# EAGLE library part LM75ADP,118 (library LM75ADP_118)
Board Mount Temperature Sensors TEMP SENSOR DIGITAL Source: Datasheet <http://www.nxp.com/docs/en/data-sheet/LM75A.pdf>
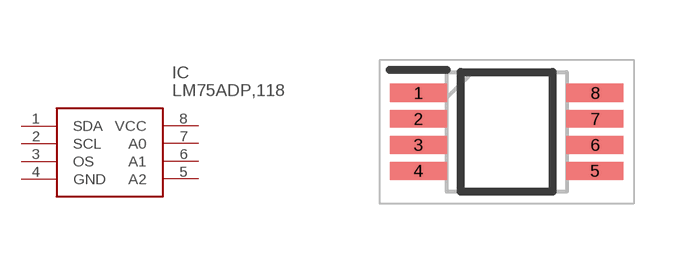
[diagram p0: symbol with the pads of SOP65P490X110-8N; footprint SOP65P490X110-8N]

Designator prefix IC

## LM75ADP,118 (Arrow_Part_Number: LM75ADP,118; Arrow_Price-Stock: https://www.arrow.com/en/products/lm75adp118/nxp-semiconductors.html?utm_currency=USD&region=europe; Description: Board Mount Temperature Sensors TEMP SENSOR DIGITAL; Height: 1.1mm; Manufacturer_Name: NXP; Manufacturer_Part_Number: LM75ADP,118; Mouser_Part_Number: 771-LM75ADP-T; Mouser_Price-Stock: https://www.mouser.co.uk/ProductDetail/NXP-Semiconductors/LM75ADP118?qs=LOCUfHb8d9vvCdlTDgESAg%3D%3D)  [SOP65P490X110-8N]
1  SDA
2  SCL
3  OS
4  GND
5  A2
6  A1
7  A0
8  VCC

## Footprint SOP65P490X110-8N (pad centres in mm)
TSSOP8
smd 1.425 x 0.45: 1 -2.212,0.975; 2 -2.212,0.325; 3 -2.212,-0.325; 4 -2.212,-0.975; 5 2.212,-0.975; 6 2.212,-0.325; 7 2.212,0.325; 8 2.212,0.975